# Altium schematic symbol library NXJ2S2405MC-R7.SchLib: 1 symbol
Pins are listed as number, name and electrical type; pins without a type are passive.

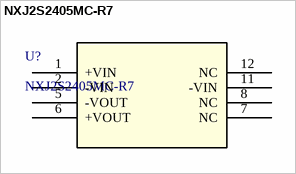
[diagram p0: symbol NXJ2S2405MC-R7]

## NXJ2S2405MC-R7
designator U?
Description; Manufacturer_Name: Murata; Copyright: Copyright (C) 2026 Ultra Librarian. All rights reserved.; Manufacturer_Part_Number: NXJ2S2405MC-R7; RefDes: RefDes; Type: Type
footprint NXJ2S_24V_MUR
pins: 1 +VIN (power), 2 -VIN (power), 5 -VOUT (power), 6 +VOUT (power), 7 NC, 8 NC, 11 -VIN (power), 12 NC